# Altium schematic symbol library 1040310811.SchLib: 1 symbol
Pins are listed as number, name and electrical type; pins without a type are passive.

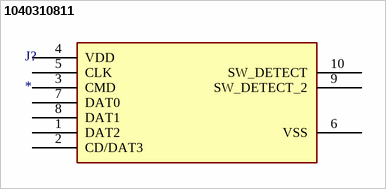
[diagram p0: symbol 1040310811]

## 1040310811
designator J?
MF: {'manufacturer': u'Molex'}; MP: 1040310811; Package: None; Price: None; Value: *; Availability: Unavailable
footprint 104031-0811_MOL
pins: 1 DAT2, 2 CD/DAT3, 3 CMD, 4 VDD (power), 5 CLK, 6 VSS, 7 DAT0, 8 DAT1, 9 SW_DETECT_2, 10 SW_DETECT